# Altium schematic symbol library DISP,Graphic,OLED,128x32,HS91L02W2C01.Schlib: 1 symbol
Pins are listed as number, name and electrical type; pins without a type are passive.

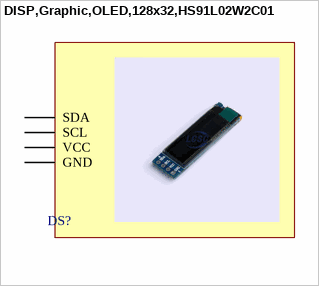
[diagram p0: symbol DISP,Graphic,OLED,128x32,HS91L02W2C01]

## DISP,Graphic,OLED,128x32,HS91L02W2C01
designator DS?
pins: 1 GND (power), 2 VCC (power), 3 SCL (power), 4 SDA (power)